# Altium integrated library WBR3.IntLib: 1 symbol
Pins are listed as number, name and electrical type; pins without a type are passive.

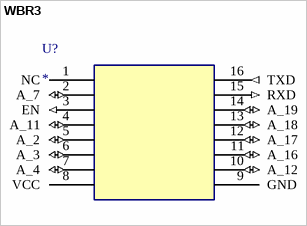
[diagram p0: symbol WBR3]

## WBR3
designator U?
Tuya WBR3 Wi-Fi + Bluetooth LE module (W701), 3.3V, UART0 on pins 15/16; MPN: WBR3; Manufacturer: Tuya
footprint WBR3 (Tuya WBR3 footprint)
pins: 1 NC, 2 A_7 (io), 3 EN (in), 4 A_11 (io), 5 A_2 (io), 6 A_3 (io), 7 A_4 (io), 8 VCC (power), 9 GND (power), 10 A_12 (io), 11 A_16 (io), 12 A_17 (io), 13 A_18 (io), 14 A_19 (io), 15 RXD (in), 16 TXD (out)